# Altium footprint library standard-case.PcbLib: 206 footprints (part 4 of 13)
Each footprint in its own frame and in the unit in brackets; x right, y up, seen from the top. Pads: shape width x height; smd on the part's side, far side on the other; paste and mask are expansions set on the pad; w line width, h text height; cw(c..) or ccw(c..) is an arc to the next point about the centre after c.
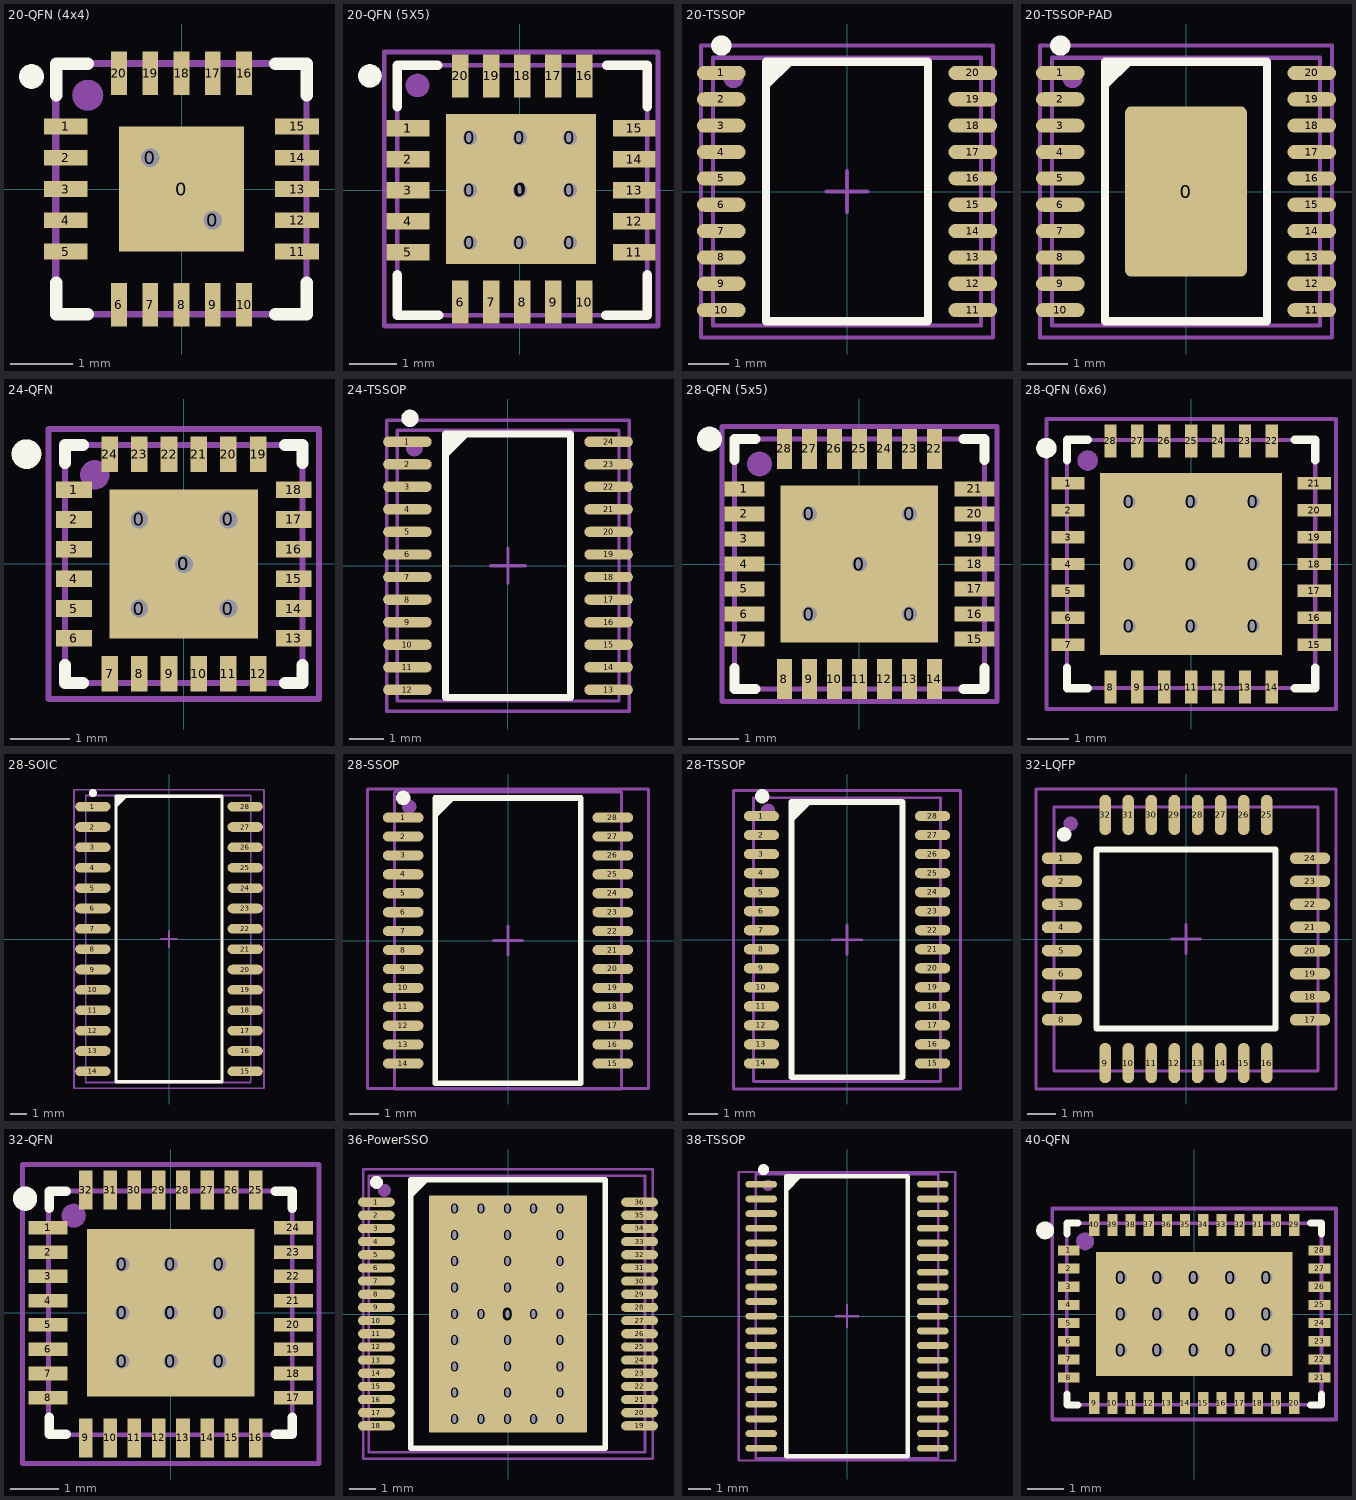
[diagram p3: the footprints below, top view; thin cyan lines are the x and y axes]

## 20-QFN (4x4) [mm] "4x4 mm, pitch 0.5 mm, power pad"
height 0.75
pads (25):
  round 0.7 hole 0.3: 0(-0.5,0.5) 0(0.5,-0.5)
  rect 2x2 smd: 0(0,0)
  rect 0.7x0.25 smd: 1(-1.85,1) 2(-1.85,0.5) 3(-1.85,0) 4(-1.85,-0.5) 5(-1.85,-1) 11(1.85,-1) 12(1.85,-0.5) 13(1.85,0) 14(1.85,0.5) 15(1.85,1)
  rect 0.25x0.7 smd: 6(-1,-1.85) 7(-0.5,-1.85) 8(0,-1.85) 9(0.5,-1.85) 10(1,-1.85) 16(1,1.85) 17(0.5,1.85) 18(0,1.85) 19(-0.5,1.85) 20(-1,1.85)
  round 0.4 on Top Overlay: ""(-2.4,1.8)
  round 0.5 on Mech1: ""(-1.5,1.5)
Top Overlay:
  lines w0.2: -2,-1.5 -2,-2 -1.5,-2 ; -2,1.5 -2,2 -1.5,2 ; 1.5,-2 2,-2 2,-1.5 ; 1.5,2 2,2 2,1.5
Mechanical 1:
  lines w0.1: -2.02,-2.01 -2.02,2.01 2,2.01 2,-2.01 -2.02,-2.01
Mechanical 15:
  lines w0.1: -0.2,0 0.2,0 ; 0,-0.2 0,0.2 ; -2,-2 -2,2 2,2 2,-2 -2,-2
3D body "User Library-QFN20_4x4x0_8.STEP": height 0.78, standoff -0.02, extent -2.02,-2.01 2,2.01

## 20-QFN (5X5) [mm] "5x5 mm, pitch 0.65 mm, power pad"
pads (32):
  round 0.7 hole 0.3: 0(-1.05,-1.1) 0(-1.05,0) 0(-1.05,1.1) 0(0,-1.1) 0(0,0) 0(0,1.1) 0(1.05,-1.1) 0(1.05,0) 0(1.05,1.1)
  rect 3.15x3.15 smd: 0(0.025,0.025)
  rect 0.9x0.35 smd: 1(-2.35,1.3) 2(-2.35,0.65) 3(-2.35,0) 4(-2.35,-0.65) 5(-2.35,-1.3) 11(2.4,-1.3) 12(2.4,-0.65) 13(2.4,0) 14(2.4,0.65) 15(2.4,1.3)
  rect 0.35x0.9 smd: 6(-1.25,-2.35) 7(-0.6,-2.35) 8(0.05,-2.35) 9(0.7,-2.35) 10(1.35,-2.35) 16(1.35,2.4) 17(0.7,2.4) 18(0.05,2.4) 19(-0.6,2.4) 20(-1.25,2.4)
  round 0.5 on Top Overlay: ""(-3.15,2.4)
  round 0.5 on Mech1: ""(-2.15,2.2)
Top Overlay:
  lines w0.2: -2.575,-1.775 -2.575,-2.625 -1.7,-2.625 ; -2.575,1.75 -2.575,2.625 -1.725,2.625 ; 1.8,-2.625 2.675,-2.625 2.675,-1.775 ; 1.825,2.625 2.675,2.625 2.675,1.75
Mechanical 1:
  lines w0.1: -2.575,-2.625 -2.575,2.625 2.675,2.625 2.675,-2.625 -2.575,-2.625
Mechanical 15:
  lines w0.1: -2.85,-2.85 -2.85,2.9 2.9,2.9 2.9,-2.85 -2.85,-2.85
3D body "User Library-VQFN-20-1.STEP": height 1, standoff -0.05, extent -2.575,-2.625 2.675,2.625

## 20-TSSOP [mm] "pitch 0.65 mm"
height 1.2
pads (21):
  oval 1.2x0.35 smd: 1(-3.1,2.925) 2(-3.1,2.275) 3(-3.1,1.625) 4(-3.1,0.975) 5(-3.1,0.325) 6(-3.1,-0.325) 7(-3.1,-0.975) 8(-3.1,-1.625) 9(-3.1,-2.275) 10(-3.1,-2.925) 11(3.1,-2.925) 12(3.1,-2.275) 13(3.1,-1.625) 14(3.1,-0.975) 15(3.1,-0.325) 16(3.1,0.325) 17(3.1,0.975) 18(3.1,1.625) 19(3.1,2.275) 20(3.1,2.925)
  round 0.5 on Mech1: ""(-2.8,2.8)
Top Overlay:
  circle w0.25: c-3.1,3.6 r0.125
  region: -2,3.2 -2,2.48 -1.28,3.2
  lines w0.2: -2,-3.2 2,-3.2 2,3.2 -2,3.2 -2,-3.2
Mechanical 1:
  lines w0.1: -3.3,-3.3 -3.3,3.3 3.3,3.3 3.3,-3.3 -3.3,-3.3
Mechanical 15:
  lines w0.1: -0.5,0 0.5,0 ; 0,-0.5 0,0.5 ; -3.6,-3.6 -3.6,3.6 3.6,3.6 3.6,-3.6 -3.6,-3.6
3D body "TSSOP-20.STEP": height 1.2, standoff 0, extent -3.3,-3.3 3.3,3.3

## 20-TSSOP-PAD [mm] "pitch 0.65 mm, power pad"
height 1.2
pads (22):
  rrect10% 3x4.2 smd: 0(0,0)
  oval 1.2x0.35 smd: 1(-3.1,2.925) 2(-3.1,2.275) 3(-3.1,1.625) 4(-3.1,0.975) 5(-3.1,0.325) 6(-3.1,-0.325) 7(-3.1,-0.975) 8(-3.1,-1.625) 9(-3.1,-2.275) 10(-3.1,-2.925) 11(3.1,-2.925) 12(3.1,-2.275) 13(3.1,-1.625) 14(3.1,-0.975) 15(3.1,-0.325) 16(3.1,0.325) 17(3.1,0.975) 18(3.1,1.625) 19(3.1,2.275) 20(3.1,2.925)
  round 0.5 on Mech1: ""(-2.8,2.8)
Top Overlay:
  circle w0.25: c-3.1,3.6 r0.125
  region: -2,3.2 -2,2.48 -1.28,3.2
  lines w0.2: -2,-3.2 2,-3.2 2,3.2 -2,3.2 -2,-3.2
Mechanical 1:
  lines w0.1: -3.3,-3.3 3.3,-3.3 3.3,3.3 -3.3,3.3 -3.3,-3.3
Mechanical 15:
  lines w0.1: -0.5,0 0.5,0 ; 0,-0.5 0,0.5 ; -3.6,-3.6 3.6,-3.6 3.6,3.6 -3.6,3.6 -3.6,-3.6
3D body "TSSOP-20.STEP": height 1.2, standoff 0, extent -3.3,-3.3 3.3,3.3

## 24-QFN [mm] "4x4 mm, pitch 0.5 mm, power pad"
height 0.75
pads (31):
  round 0.7 hole 0.3: 0(-0.75,-0.75) 0(-0.75,0.75) 0(0,0) 0(0.75,-0.75) 0(0.75,0.75)
  rect 2.5x2.5 smd: 0(0,0)
  rect 0.6x0.28 smd: 1(-1.85,1.25) 2(-1.85,0.75) 3(-1.85,0.25) 4(-1.85,-0.25) 5(-1.85,-0.75) 6(-1.85,-1.25) 13(1.85,-1.25) 14(1.85,-0.75) 15(1.85,-0.25) 16(1.85,0.25) 17(1.85,0.75) 18(1.85,1.25)
  rect 0.28x0.6 smd: 7(-1.25,-1.85) 8(-0.75,-1.85) 9(-0.25,-1.85) 10(0.25,-1.85) 11(0.75,-1.85) 12(1.25,-1.85) 19(1.25,1.85) 20(0.75,1.85) 21(0.25,1.85) 22(-0.25,1.85) 23(-0.75,1.85) 24(-1.25,1.85)
  round 0.5 on Mech1: ""(-1.5,1.5)
Top Overlay:
  circle w0.25: c-2.65,1.85 r0.125
  lines w0.2: -2,-1.7 -2,-2 -1.7,-2 ; -2,1.7 -2,2 -1.7,2 ; 1.7,-2 2,-2 2,-1.7 ; 1.7,2 2,2 2,1.7
Mechanical 1:
  lines w0.1: -2,-2 2,-2 2,2 -2,2 -2,-2
Mechanical 15:
  lines w0.1: -0.5,0 0.5,0 ; 0,-0.5 0,0.5 ; -2.275,-2.275 2.275,-2.275 2.275,2.275 -2.275,2.275 -2.275,-2.275
3D body "24-QFN (4x4 mm).step": height 0.75, standoff 0, extent -2,-2 2,2

## 24-TSSOP [mm] "pitch 0.65 mm"
height 1.2
pads (25):
  rrect100% 1.4x0.3 smd: 1(-2.9,3.575)
  oval 1.4x0.3 smd: 2(-2.9,2.925) 3(-2.9,2.275) 4(-2.9,1.625) 5(-2.9,0.975) 6(-2.9,0.325) 7(-2.9,-0.325) 8(-2.9,-0.975) 9(-2.9,-1.625) 10(-2.9,-2.275) 11(-2.9,-2.925) 12(-2.9,-3.575) 13(2.9,-3.575) 14(2.9,-2.925) 15(2.9,-2.275) 16(2.9,-1.625) 17(2.9,-0.975) 18(2.9,-0.325) 19(2.9,0.325) 20(2.9,0.975) 21(2.9,1.625) 22(2.9,2.275) 23(2.9,2.925) 24(2.9,3.575)
  round 0.5 on Mech1: ""(-2.7,3.4)
Top Overlay:
  circle w0.25: c-2.825,4.25 r0.125
  region: -1.8,3.8 -1.8,3.08 -1.08,3.8
  lines w0.2: -1.8,-3.8 1.8,-3.8 1.8,3.8 -1.8,3.8 -1.8,-3.8
Mechanical 1:
  lines w0.1: -3.2,-3.9 3.2,-3.9 3.2,3.9 -3.2,3.9 -3.2,-3.9
Mechanical 15:
  lines w0.1: -0.5,0 0.5,0 ; 0,-0.5 0,0.5 ; -3.5,-4.2 3.5,-4.2 3.5,4.2 -3.5,4.2 -3.5,-4.2
3D body "TSSOP24.STEP": height 1.2, standoff 0, extent -3.2,-3.9 3.2,3.9

## 28-QFN (5x5) [mm] "5x5 mm, pitch 0.5 mm, power pad"
height 0.9
pads (36):
  round 0.7 hole 0.3: 0(-1,-1) 0(-1,1) 0(0,0) 0(1,-1) 0(1,1)
  rect 3.15x3.15 smd: 0(0,0)
  rect 0.8x0.3 smd: 1(-2.3,1.5) 2(-2.3,1) 3(-2.3,0.5) 4(-2.3,0) 5(-2.3,-0.5) 6(-2.3,-1) 7(-2.3,-1.5) 15(2.3,-1.5) 16(2.3,-1) 17(2.3,-0.5) 18(2.3,0) 19(2.3,0.5) 20(2.3,1) 21(2.3,1.5)
  rect 0.3x0.8 smd: 8(-1.5,-2.3) 9(-1,-2.3) 10(-0.5,-2.3) 11(0,-2.3) 12(0.5,-2.3) 13(1,-2.3) 14(1.5,-2.3) 22(1.5,2.3) 23(1,2.3) 24(0.5,2.3) 25(0,2.3) 26(-0.5,2.3) 27(-1,2.3) 28(-1.5,2.3)
  round 0.5 on Top Overlay: ""(-3,2.5)
  round 0.5 on Mech1: ""(-2,2)
Top Overlay:
  lines w0.2: -2.5,-2.075 -2.5,-2.5 -2.075,-2.5 ; -2.5,2.075 -2.5,2.5 -2.075,2.5 ; 2.075,-2.5 2.5,-2.5 2.5,-2.075 ; 2.075,2.5 2.5,2.5 2.5,2.075
Mechanical 1:
  lines w0.1: -2.5,-2.5 2.5,-2.5 2.5,2.5 -2.5,2.5 -2.5,-2.5
Mechanical 15:
  lines w0.1: -0.5,0 0.5,0 ; 0,-0.5 0,0.5 ; -2.75,-2.75 -2.75,2.75 2.75,2.75 2.75,-2.75 -2.75,-2.75
3D body "28-QFN, 0.5 mm.step": height 0.9, standoff 0, extent -2.5,-2.5 2.5,2.5

## 28-QFN (6x6) [mm] "6x6 mm, pitch 0.65 mm, power pad"
height 0.9
pads (40):
  round 0.7 hole 0.3: 0(-1.5,-1.5) 0(-1.5,0) 0(-1.5,1.5) 0(0,-1.5) 0(0,0) 0(0,1.5) 0(1.5,-1.5) 0(1.5,0) 0(1.5,1.5)
  rect 4.4x4.4 smd: 0(0,0)
  rect 0.8x0.3 smd: 1(-2.975,1.95) 2(-2.975,1.3) 3(-2.975,0.65) 4(-2.975,0) 5(-2.975,-0.65) 6(-2.975,-1.3) 7(-2.975,-1.95) 15(2.975,-1.95) 16(2.975,-1.3) 17(2.975,-0.65) 18(2.975,0) 19(2.975,0.65) 20(2.975,1.3) 21(2.975,1.95)
  rect 0.3x0.8 smd: 8(-1.95,-2.975) 9(-1.3,-2.975) 10(-0.65,-2.975) 11(0,-2.975) 12(0.65,-2.975) 13(1.3,-2.975) 14(1.95,-2.975) 22(1.95,2.975) 23(1.3,2.975) 24(0.65,2.975) 25(0,2.975) 26(-0.65,2.975) 27(-1.3,2.975) 28(-1.95,2.975)
  round 0.5 on Top Overlay: ""(-3.5,2.8)
  round 0.5 on Mech1: ""(-2.5,2.5)
Top Overlay:
  lines w0.2: -3,-2.5 -3,-3 -2.5,-3 ; -3,2.5 -3,3 -2.5,3 ; 2.5,-3 3,-3 3,-2.5 ; 2.5,3 3,3 3,2.5
Mechanical 1:
  lines w0.1: -3,-3 -3,3 3,3 3,-3 -3,-3
Mechanical 15:
  lines w0.1: -0.5,0 0,0 0.5,0 ; 0,-0.5 0,0.5 ; -3.5,-3.5 -3.5,3.5 3.5,3.5 3.5,-3.5 -3.5,-3.5
3D body "User Library-QFN-28.STEP": height 1.02, standoff -0.08, extent -3,-3 3,3

## 28-SOIC [mm] "pitch 1.27 mm"
height 2.65
pads (29):
  rrect100% 2.2x0.6 smd: 1(-4.75,8.255) 2(-4.75,6.985) 3(-4.75,5.715) 4(-4.75,4.445) 5(-4.75,3.175) 6(-4.75,1.905) 7(-4.75,0.635) 8(-4.75,-0.635) 9(-4.75,-1.905) 10(-4.75,-3.175) 11(-4.75,-4.445) 12(-4.75,-5.715) 13(-4.75,-6.985) 14(-4.75,-8.255) 15(4.75,-8.255) 16(4.75,-6.985) 17(4.75,-5.715) 18(4.75,-4.445) 19(4.75,-3.175) 20(4.75,-1.905) 21(4.75,-0.635) 22(4.75,0.635) 23(4.75,1.905) 24(4.75,3.175) 25(4.75,4.445) 26(4.75,5.715) 27(4.75,6.985) 28(4.75,8.255)
  round 0.5 on Mech1: ""(-4.5,8.3)
Top Overlay:
  circle w0.25: c-4.75,9.105 r0.125
  region: -3.3,8.9 -3.3,8.18 -2.58,8.9
  lines w0.2: -3.3,-8.9 3.3,-8.9 3.3,8.9 -3.3,8.9 -3.3,-8.9
Mechanical 1:
  lines w0.1: -5.2,-8.95 5.1,-8.95 5.1,8.95 -5.2,8.95 -5.2,-8.95
Mechanical 15:
  lines w0.1: -0.5,0 0.5,0 ; 0,-0.5 0,0.5 ; -5.925,-9.3 5.925,-9.3 5.925,9.3 -5.925,9.3 -5.925,-9.3
3D body "User Library-28-SOIC.STEP": height 2.73, standoff -0.03, extent -5.2,-8.95 5.1,8.95

## 28-SSOP [mm] "pitch 0.65 mm"
pads (30):
  rrect100% 1.4x0.35 smd: 1(-3.6,4.225) 2(-3.6,3.575) 3(-3.6,2.925) 4(-3.6,2.275) 5(-3.6,1.625) 6(-3.6,0.975) 7(-3.6,0.325) 8(-3.6,-0.325) 9(-3.6,-0.975) 10(-3.6,-1.625) 11(-3.6,-2.275) 12(-3.6,-2.925) 13(-3.6,-3.575) 14(-3.6,-4.225) 15(3.6,-4.225) 16(3.6,-3.575) 17(3.6,-2.925) 18(3.6,-2.275) 19(3.6,-1.625) 20(3.6,-0.975) 21(3.6,-0.325) 22(3.6,0.325) 23(3.6,0.975) 24(3.6,1.625) 25(3.6,2.275) 26(3.6,2.925) 27(3.6,3.575) 28(3.6,4.225)
  round 0.5 on Top Overlay: ""(-3.6,4.9)
  round 0.5 on Mech1: ""(-3.4,4.6)
Top Overlay:
  region: -2.5,4.9 -2.5,4.18 -1.78,4.9
  lines w0.2: -2.5,-4.9 2.5,-4.9 2.5,4.9 -2.5,4.9 -2.5,-4.9
Mechanical 1:
  lines w0.1: -3.9,-5.1 -3.9,5.1 3.9,5.1 3.9,-5.1 -3.9,-5.1
Mechanical 15:
  lines w0.1: -0.5,0 0.5,0 ; 0,-0.5 0,0.5 ; -4.826,-5.08 -4.826,5.207 4.826,5.207 4.826,-5.08 -4.826,-5.08
3D body "User Library-SSOP-28-1.STEP": height 2.15, standoff 0, extent -3.878,-5.165 3.878,5.165

## 28-TSSOP [mm] "pitch 0.65 mm"
height 2.65
pads (30):
  oval 1.2x0.35 smd: 1(-2.925,4.225) 2(-2.925,3.575) 3(-2.925,2.925) 4(-2.925,2.275) 5(-2.925,1.625) 6(-2.925,0.975) 7(-2.925,0.325) 8(-2.925,-0.325) 9(-2.925,-0.975) 10(-2.925,-1.625) 11(-2.925,-2.275) 12(-2.925,-2.925) 13(-2.925,-3.575) 14(-2.925,-4.225) 15(2.925,-4.225) 16(2.925,-3.575) 17(2.925,-2.925) 18(2.925,-2.275) 19(2.925,-1.625) 20(2.925,-0.975) 21(2.925,-0.325) 22(2.925,0.325) 23(2.925,0.975) 24(2.925,1.625) 25(2.925,2.275) 26(2.925,2.925) 27(2.925,3.575) 28(2.925,4.225)
  round 0.5 on Top Overlay: ""(-2.9,4.9)
  round 0.5 on Mech1: ""(-2.7,4.4)
Top Overlay:
  region: -1.9,4.7 -1.9,3.98 -1.18,4.7
  lines w0.2: -1.9,-4.7 -1.9,4.7 1.9,4.7 1.9,-4.7 -1.9,-4.7
Mechanical 1:
  lines w0.1: -3.2,-4.85 -3.2,4.85 3.2,4.85 3.2,-4.85 -3.2,-4.85
Mechanical 15:
  lines w0.1: -0.5,0 0.5,0 ; 0,-0.5 0,0.5 ; -3.875,-5.1 -3.875,5.1 3.875,5.1 3.875,-5.1 -3.875,-5.1
3D body "User Library-TSSOP-28.STEP": height 1.2, standoff 0, extent -3.2,-4.85 3.2,4.85

## 32-LQFP [mm] "pitch 0.8 mm"
height 1.6
pads (33):
  rrect100% 1.4x0.4 smd: 1(-4.3,2.8) 2(-4.3,2) 3(-4.3,1.2) 4(-4.3,0.4) 5(-4.3,-0.4) 6(-4.3,-1.2) 7(-4.3,-2) 8(-4.3,-2.8) 17(4.3,-2.8) 18(4.3,-2) 19(4.3,-1.2) 20(4.3,-0.4) 21(4.3,0.4) 22(4.3,1.2) 23(4.3,2) 24(4.3,2.8)
  rrect100% 0.4x1.4 smd: 9(-2.8,-4.3) 10(-2,-4.3) 11(-1.2,-4.3) 12(-0.4,-4.3) 13(0.4,-4.3) 14(1.2,-4.3) 15(2,-4.3) 16(2.8,-4.3) 25(2.8,4.3) 26(2,4.3) 27(1.2,4.3) 28(0.4,4.3) 29(-0.4,4.3) 30(-1.2,4.3) 31(-2,4.3) 32(-2.8,4.3)
  round 0.5 on Mech1: ""(-4,4)
Top Overlay:
  circle w0.25: c-4.225,3.625 r0.125
  lines w0.2: -3.1,-3.1 3.1,-3.1 3.1,3.1 -3.1,3.1 -3.1,-3.1
Mechanical 1:
  lines w0.1: -4.572,-4.572 -4.572,4.572 4.572,4.572 4.572,-4.572 -4.572,-4.572
Mechanical 15:
  lines w0.1: -0.5,0 0.5,0 ; 0,-0.5 0,0.5 ; -5.2,-5.2 5.2,-5.2 5.2,5.2 -5.2,5.2 -5.2,-5.2
3D body "User Library-LQFP32-2.STEP": height 1.62, standoff -0.01, extent -4.572,-4.572 4.572,4.572

## 32-QFN [mm] "5x5 mm, pitch 0.5 mm, power pad"
height 1
pads (43):
  round 0.7 hole 0.3: 0(-1,-1) 0(-1,0) 0(-1,1) 0(0,-1) 0(0,0) 0(0,1) 0(1,-1) 0(1,0) 0(1,1)
  rect 3.45x3.45 smd paste-1.725 mask+0.07: 0(0,0)
  rect 0.8x0.28 smd paste-0.025 mask+0.07: 1(-2.525,1.75) 2(-2.525,1.25) 3(-2.525,0.75) 4(-2.525,0.25) 5(-2.525,-0.25) 6(-2.525,-0.75) 7(-2.525,-1.25) 8(-2.525,-1.75) 17(2.525,-1.75) 18(2.525,-1.25) 19(2.525,-0.75) 20(2.525,-0.25) 21(2.525,0.25) 22(2.525,0.75) 23(2.525,1.25) 24(2.525,1.75)
  rect 0.28x0.8 smd paste-0.025 mask+0.07: 9(-1.75,-2.575) 10(-1.25,-2.575) 11(-0.75,-2.575) 12(-0.25,-2.575) 13(0.25,-2.575) 14(0.75,-2.575) 15(1.25,-2.575) 16(1.75,-2.575) 25(1.75,2.525) 26(1.25,2.525) 27(0.75,2.525) 28(0.25,2.525) 29(-0.25,2.525) 30(-0.75,2.525) 31(-1.25,2.525) 32(-1.75,2.525)
  round 0.5 on Mech1: ""(-2,2)
Top Overlay:
  circle w0.25: c-3,2.35 r0.125
  lines w0.2: -2.5,-2.15 -2.5,-2.5 -2.15,-2.5 ; -2.5,2.15 -2.5,2.5 -2.15,2.5 ; 2.15,-2.5 2.5,-2.5 2.5,-2.15 ; 2.15,2.5 2.5,2.5 2.5,2.15
Top Paste:
  region: -0.15,1.6 -1.6,1.6 -1.6,0.15 -0.15,0.15
  rectangle: 0.15,0.15 1.6,1.6
  rectangle: 0.15,-1.6 1.6,-0.15
  region: -0.15,-0.15 -1.6,-0.15 -1.6,-1.6 -0.15,-1.6
Mechanical 1:
  lines w0.1: -2.519,-2.51 2.501,-2.51 2.501,2.51 -2.519,2.51 -2.519,-2.51
Mechanical 15:
  lines w0.1: -0.5,0 0.5,0 ; 0,-0.5 0,0.5 ; -3.05,-3.1 -3.05,3.05 3.05,3.05 3.05,-3.1 -3.05,-3.1
3D body "User Library-UFQFPN-32.STEP": height 0.55, standoff 0, extent -2.5,-2.5 2.5,2.5

## 36-PowerSSO [mm] "pitch 0.5 mm, power pad"
height 2.5
pads (72):
  round 0.7 hole 0.3: 0(-2,-4) 0(-2,-3) 0(-2,-2) 0(-2,-1) 0(-2,0) 0(-2,1) 0(-2,2) 0(-2,3) 0(-2,4) 0(-1,-4) 0(-1,0) 0(-1,4) 0(0,-4) 0(0,-3) 0(0,-2) 0(0,-1) 0(0,0) 0(0,1) 0(0,2) 0(0,3) 0(0,4) 0(1,-4) 0(1,0) 0(1,4) 0(2,-4) 0(2,-3) 0(2,-2) 0(2,-1) 0(2,0) 0(2,1) 0(2,2) 0(2,3) 0(2,4)
  rect 6x9 smd: 0(0,0)
  rrect100% 1.4x0.35 smd: 1(-5,4.25) 2(-5,3.75) 3(-5,3.25) 4(-5,2.75) 5(-5,2.25) 6(-5,1.75) 7(-5,1.25) 8(-5,0.75) 9(-5,0.25) 10(-5,-0.25) 11(-5,-0.75) 12(-5,-1.25) 13(-5,-1.75) 14(-5,-2.25) 15(-5,-2.75) 16(-5,-3.25) 17(-5,-3.75) 18(-5,-4.25) 19(5,-4.25) 20(5,-3.75) 21(5,-3.25) 22(5,-2.75) 23(5,-2.25) 24(5,-1.75) 25(5,-1.25) 26(5,-0.75) 27(5,-0.25) 28(5,0.25) 29(5,0.75) 30(5,1.25) 31(5,1.75) 32(5,2.25) 33(5,2.75) 34(5,3.25) 35(5,3.75) 36(5,4.25)
  round 0.5 on Top Overlay: ""(-5,5)
  round 0.5 on Mech1: ""(-4.7,4.7)
Top Overlay:
  region: -3.7,5.1 -3.7,4.38 -2.98,5.1
  lines w0.2: -3.7,-5.1 3.7,-5.1 3.7,5.1 -3.7,5.1 -3.7,-5.1
Mechanical 1:
  lines w0.1: -5.294,-5.25 5.206,-5.25 5.206,5.25 -5.294,5.25 -5.294,-5.25
Mechanical 15:
  lines w0.1: -0.5,0 0.5,0 ; 0,-0.5 0,0.5 ; -5.5,-5.5 5.5,-5.5 5.5,5.5 -5.5,5.5 -5.5,-5.5
3D body "User Library-PowerSSO36-EPU.STEP": height 2.31, standoff -0.01, extent -5.294,-5.25 5.206,5.25

## 38-TSSOP [mm] "pitch 0.65 mm"
height 1.2
pads (40):
  oval 1.4x0.3 smd: 1(-3.8,5.85) 2(-3.8,5.2) 3(-3.8,4.55) 4(-3.8,3.9) 5(-3.8,3.25) 6(-3.8,2.6) 7(-3.8,1.95) 8(-3.8,1.3) 9(-3.8,0.65) 10(-3.8,0) 11(-3.8,-0.65) 12(-3.8,-1.3) 13(-3.8,-1.95) 14(-3.8,-2.6) 15(-3.8,-3.25) 16(-3.8,-3.9) 17(-3.8,-4.55) 18(-3.8,-5.2) 19(-3.8,-5.85) 20(3.8,-5.85) 21(3.8,-5.2) 22(3.8,-4.55) 23(3.8,-3.9) 24(3.8,-3.25) 25(3.8,-2.6) 26(3.8,-1.95) 27(3.8,-1.3) 28(3.8,-0.65) 29(3.8,0) 30(3.8,0.65) 31(3.8,1.3) 32(3.8,1.95) 33(3.8,2.6) 34(3.8,3.25) 35(3.8,3.9) 36(3.8,4.55) 37(3.8,5.2) 38(3.8,5.85)
  round 0.5 on Top Overlay: ""(-3.7,6.5)
  round 0.5 on Mech1: ""(-3.5,5.8)
Top Overlay:
  region: -2.7,6.2 -2.7,5.48 -1.98,6.2
  lines w0.2: -2.7,-6.2 2.7,-6.2 2.7,6.2 -2.7,6.2 -2.7,-6.2
Mechanical 1:
  lines w0.1: -4.05,-6.3 4.05,-6.3 4.05,6.3 -4.05,6.3 -4.05,-6.3
Mechanical 15:
  lines w0.1: -0.5,0 0.5,0 ; 0,-0.5 0,0.5 ; -4.8,-6.4 -4.8,6.4 4.8,6.4 4.8,-6.4 -4.8,-6.4
3D body "User Library-TSSOP-38 12_6x6_2.STEP": height 1.1, standoff 0, extent -4.05,-6.3 4.05,6.3

## 40-QFN [mm] "5x7 mm, pitch 0.5 mm, power pad"
height 0.9
pads (58):
  round 0.7 hole 0.3: 0(-2,-1) 0(-2,0) 0(-2,1) 0(-1,-1) 0(-1,0) 0(-1,1) 0(0,-1) 0(0,0) 0(0,1) 0(1,-1) 0(1,0) 0(1,1) 0(2,-1) 0(2,0) 0(2,1)
  rect 5.4x3.4 smd: 0(0,0)
  rect 0.6x0.28 smd: 1(-3.45,1.75) 2(-3.45,1.25) 3(-3.45,0.75) 4(-3.45,0.25) 5(-3.45,-0.25) 6(-3.45,-0.75) 7(-3.45,-1.25) 8(-3.45,-1.75) 21(3.45,-1.75) 22(3.45,-1.25) 23(3.45,-0.75) 24(3.45,-0.25) 25(3.45,0.25) 26(3.45,0.75) 27(3.45,1.25) 28(3.45,1.75)
  rect 0.28x0.6 smd: 9(-2.75,-2.45) 10(-2.25,-2.45) 11(-1.75,-2.45) 12(-1.25,-2.45) 13(-0.75,-2.45) 14(-0.25,-2.45) 15(0.25,-2.45) 16(0.75,-2.45) 17(1.25,-2.45) 18(1.75,-2.45) 19(2.25,-2.45) 20(2.75,-2.45) 29(2.75,2.45) 30(2.25,2.45) 31(1.75,2.45) 32(1.25,2.45) 33(0.75,2.45) 34(0.25,2.45) 35(-0.25,2.45) 36(-0.75,2.45) 37(-1.25,2.45) 38(-1.75,2.45) 39(-2.25,2.45) 40(-2.75,2.45)
  round 0.5 on Top Overlay: ""(-4.1,2.3)
  round 0.5 on Mech1: ""(-3,2)
Top Overlay:
  lines w0.2: -3.5,-2.2 -3.5,-2.5 -3.2,-2.5 ; -3.5,2.2 -3.5,2.5 -3.2,2.5 ; 3.2,-2.5 3.5,-2.5 3.5,-2.2 ; 3.2,2.5 3.5,2.5 3.5,2.2
Mechanical 1:
  lines w0.1: -3.5,-2.5 -3.5,2.5 3.5,2.5 3.5,-2.5 -3.5,-2.5
Mechanical 15:
  lines w0.1: -0.5,0 0.5,0 ; 0,-0.5 0,0.5 ; -3.9,-2.9 -3.9,2.9 3.9,2.9 3.9,-2.9 -3.9,-2.9
3D body "User Library-QFN 40-Pin 0_5mm Pitch (7_0mm x 5_0mm).STEP": height 1, standoff 0, extent -3.505,-2.505 3.505,2.505